# Altium footprint library PMBT2222A.PcbLib: 1 footprints
Each footprint in its own frame and in the unit in brackets; x right, y up, seen from the top. Pads: shape width x height; smd on the part's side, far side on the other; paste and mask are expansions set on the pad; w line width, h text height; cw(c..) or ccw(c..) is an arc to the next point about the centre after c.
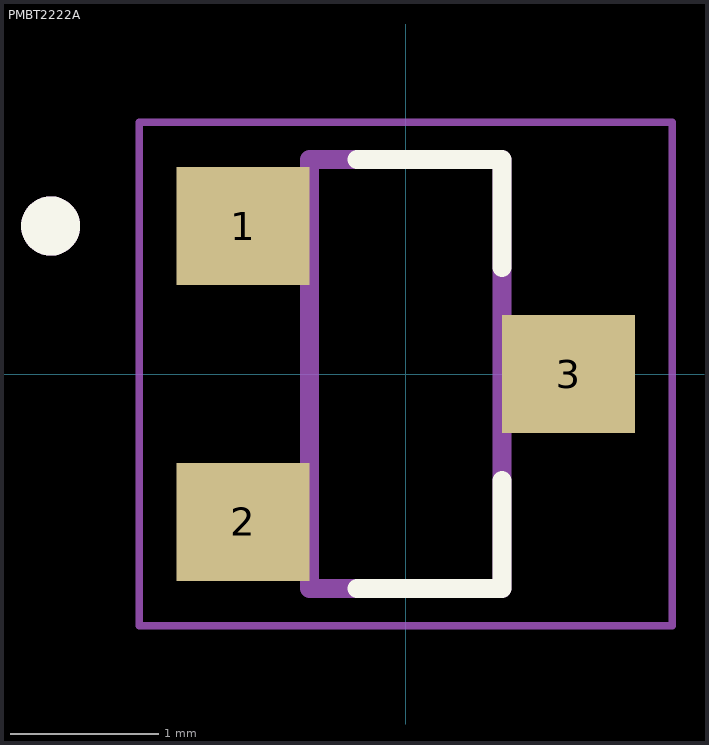
[diagram p0: the footprint, top view; thin cyan lines are the x and y axes]

## PMBT2222A [mm] "TO-236AB"
height 1.1
pads (3):
  rect 0.9x0.8 smd: 1(-1.1,1) 2(-1.1,-1) 3(1.1,0)
Top Overlay:
  circle w0.2: c-2.4,1 r0.1
  lines w0.127: -0.33,-1.45 0.65,-1.45 0.65,-0.72 ; -0.33,1.45 0.65,1.45 0.65,0.72
Mechanical 13:
  circle w0.2: c-2.4,1 r0.1
  lines w0.127: -0.65,-1.45 -0.65,1.45 0.65,1.45 0.65,-1.45 -0.65,-1.45
Mechanical 15:
  lines w0.05: -1.8,-1.7 1.8,-1.7 1.8,1.7 -1.8,1.7 -1.8,-1.7
3D body "step_temp.STEP": height 1.1, standoff 0, extent -1.25,-1.45 1.25,1.45